# Altium schematic symbol library SQ2319CES-T1_GE3.SchLib: 1 symbol
Pins are listed as number, name and electrical type; pins without a type are passive.

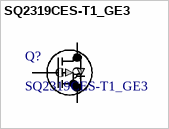
[diagram p0: symbol SQ2319CES-T1_GE3]

## SQ2319CES-T1_GE3
designator Q?
P-CHANNEL 40-V (D-S) MOSFET; Manufacturer_Name: Vishay; Copyright: Copyright (C) 2025 Ultra Librarian. All rights reserved.; Manufacturer_Part_Number: SQ2319CES-T1_GE3
footprint PMOSGSD_SOT-23_TO-236_VIS
pins: 1 G, 2 S, 3 D